# Altium schematic symbol library Schottky diode, SMA.SchLib: 1 symbol
Pins are listed as number, name and electrical type; pins without a type are passive.

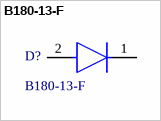
[diagram p0: symbol B180-13-F]

## B180-13-F
designator D?
Schottky diode, SMA; Supplier 1: Newark; Supplier Part Number 1: B180-13-F; JLCPCB Part #: C155354
footprint D_SMA_DO-214AC (Molded Diode, 2-Leads, Body 4.30x2.61mm, IPC Medium Density)
pins: 1 C, 2 A